# Altium footprint library WR-TBL_Pluggable Connector_5.08mm.PcbLib: 295 footprints (part 16 of 19)
Each footprint in its own frame and in the unit in brackets; x right, y up, seen from the top. Pads: shape width x height; smd on the part's side, far side on the other; paste and mask are expansions set on the pad; w line width, h text height; cw(c..) or ccw(c..) is an arc to the next point about the centre after c.
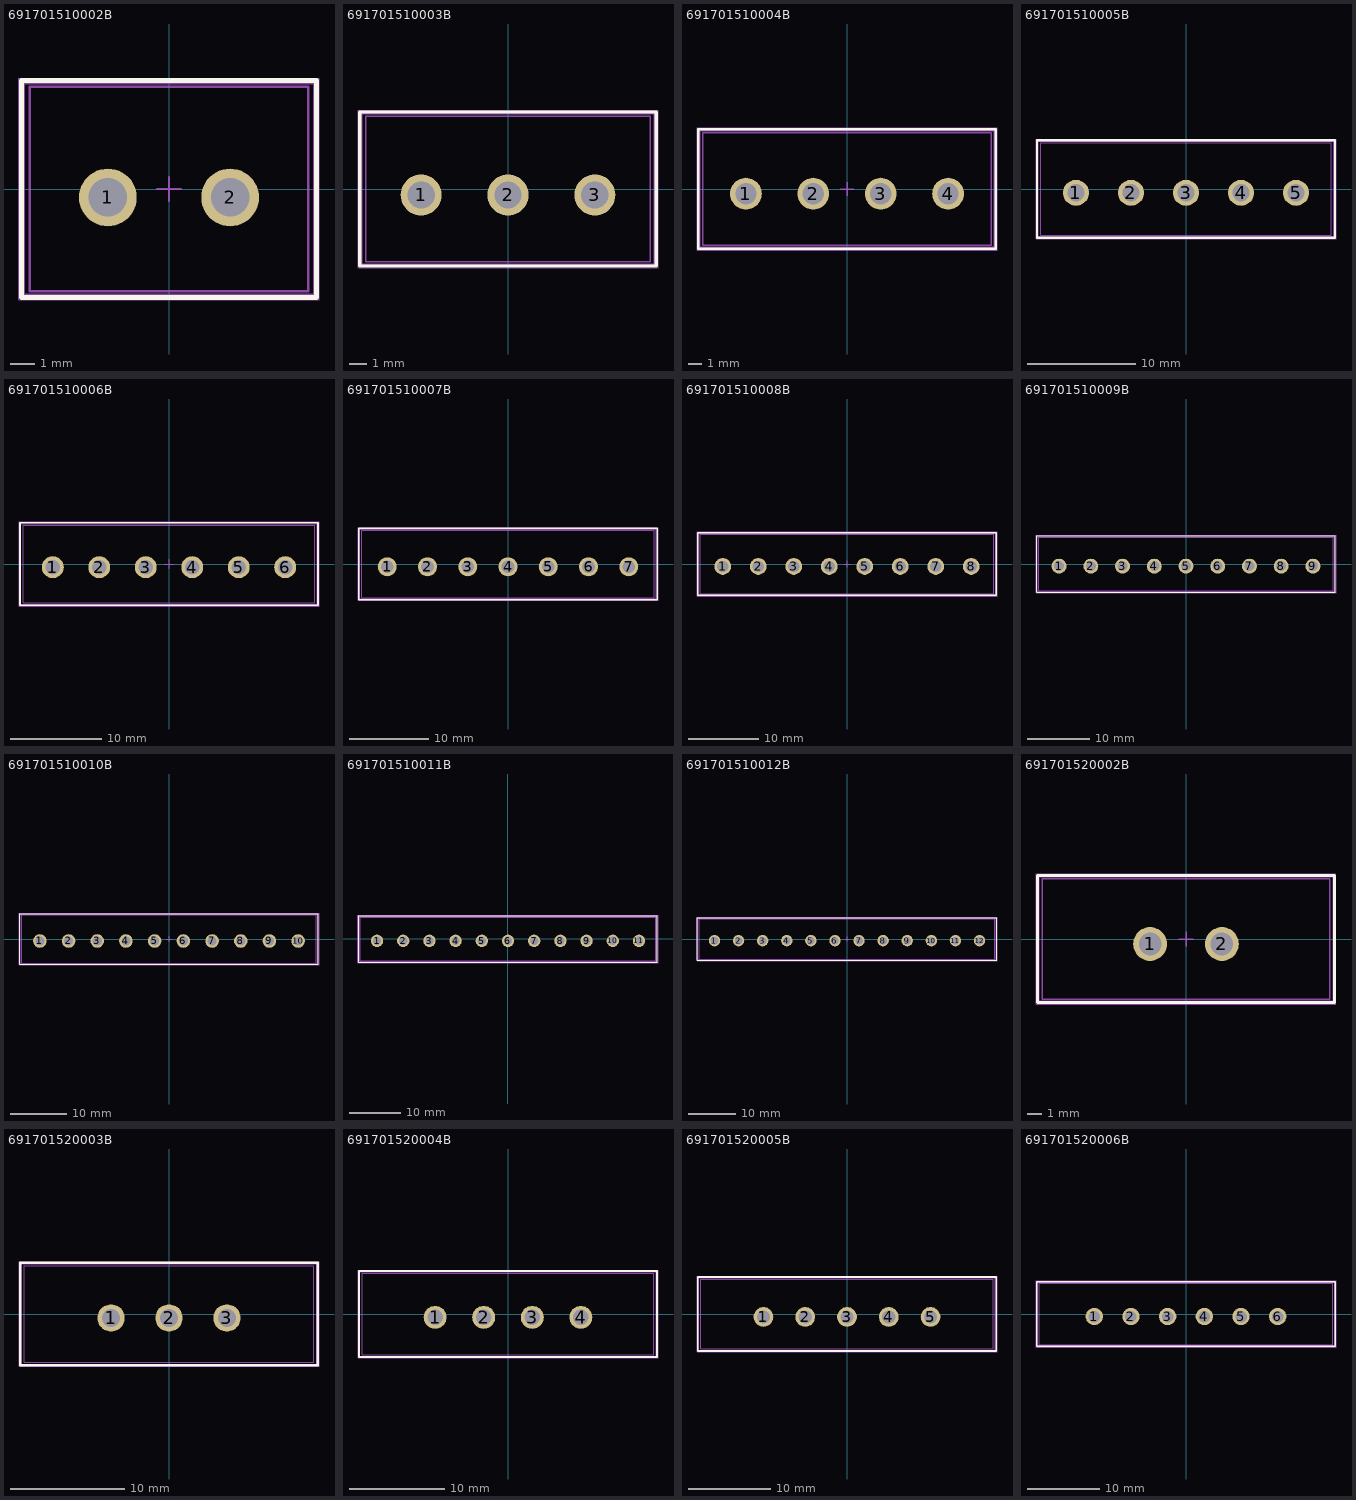
[diagram p15: the footprints below, top view; thin cyan lines are the x and y axes]

## 691701510002B [mm] "THR - 5,08mm - PCB Vertical Close - 02p"
height 12
pads (2):
  round 2.4 hole 1.6: 1(-2.54,-0.35) 2(2.54,-0.35)
Top Overlay:
  lines w0.2: -6.13,-4.5 6.13,-4.5 6.13,4.5 -6.13,4.5 -6.13,-4.5
Top Paste:
  region: 0.54,1.5 4.54,1.5 4.54,-2.2 0.54,-2.2
  region: -4.54,1.5 -0.54,1.5 -0.54,-2.2 -4.54,-2.2
Assembly Notes:
  text "Stencil thickness : 120 μm" at -5.156,-5.301 h1
Top Assembly:
  lines w0.1: -6.03,-4.4 -6.03,4.4 6.03,4.4 6.03,-4.4 -6.03,-4.4
Top Designator:
  text ".Designator" at -3.647,-0.357 h1
Top 3D Body:
  lines w0.1: -5.78,-4.25 5.78,-4.25 5.78,4.25 -5.78,4.25 -5.78,-4.25
Top Courtyard:
  lines w0.05: -6.23,-4.6 6.23,-4.6 6.23,4.6 -6.23,4.6 -6.23,-4.6
Top Component Center:
  lines w0.1: -0.5,0 0.5,0 ; 0,-0.5 0,0.5
3D body "691701510002B.stp": height 12.1, standoff -2.5, extent -5.78,-4.25 5.78,4.25

## 691701510003B [mm] "THR - 5,08mm - PCB Vertical Close - 03p"
height 12
pads (3):
  round 2.4 hole 1.6: 1(-5.08,-0.35) 2(0,-0.35) 3(5.08,-0.35)
Top Overlay:
  lines w0.2: -8.67,-4.5 8.67,-4.5 8.67,4.5 -8.67,4.5 -8.67,-4.5
Top Paste:
  region: 3.08,1.5 7.08,1.5 7.08,-2.2 3.08,-2.2
  region: -7.08,1.5 -3.08,1.5 -3.08,-2.2 -7.08,-2.2
  region: -2,1.5 2,1.5 2,-2.2 -2,-2.2
Assembly Notes:
  text "Stencil thickness : 120 μm" at -5.156,-5.301 h1
Top Assembly:
  lines w0.1: -8.57,-4.4 -8.57,4.4 8.57,4.4 8.57,-4.4 -8.57,-4.4
Top Designator:
  text ".Designator" at -3.647,-0.357 h1
Top 3D Body:
  lines w0.1: -8.32,-4.25 8.32,-4.25 8.32,4.25 -8.32,4.25 -8.32,-4.25
Top Courtyard:
  lines w0.05: -8.77,-4.6 8.77,-4.6 8.77,4.6 -8.77,4.6 -8.77,-4.6
Top Component Center:
  lines w0.1: -0.5,0 0.5,0 ; 0,-0.5 0,0.5
3D body "691701510003B.stp": height 12.1, standoff -2.5, extent -8.32,-4.25 8.32,4.25

## 691701510004B [mm] "THR - 5,08mm - PCB Vertical Close - 04p"
height 12
pads (4):
  round 2.4 hole 1.6: 1(-7.62,-0.35) 2(-2.54,-0.35) 3(2.54,-0.35) 4(7.62,-0.35)
Top Overlay:
  lines w0.2: -11.21,-4.5 -11.21,4.5 11.21,4.5 11.21,-4.5 -11.21,-4.5
Top Paste:
  region: 0.54,1.5 4.54,1.5 4.54,-2.2 0.54,-2.2
  region: -9.62,1.5 -5.62,1.5 -5.62,-2.2 -9.62,-2.2
  region: -4.54,1.5 -0.54,1.5 -0.54,-2.2 -4.54,-2.2
  region: 5.62,1.5 9.62,1.5 9.62,-2.2 5.62,-2.2
Assembly Notes:
  text "Stencil thickness : 120 μm" at -5.156,-5.301 h1
Top Assembly:
  lines w0.1: -11.11,-4.4 11.11,-4.4 11.11,4.4 -11.11,4.4 -11.11,-4.4
Top Designator:
  text ".Designator" at -3.647,-0.357 h1
Top 3D Body:
  lines w0.1: -10.86,-4.25 -10.86,4.25 10.86,4.25 10.86,-4.25 -10.86,-4.25
Top Courtyard:
  lines w0.05: -11.31,-4.6 -11.31,4.6 11.31,4.6 11.31,-4.6 -11.31,-4.6
Top Component Center:
  lines w0.1: -0.5,0 0.5,0 ; 0,-0.5 0,0.5
3D body "691701510004B.stp": height 12.1, standoff -2.5, extent -10.86,-4.25 10.86,4.25

## 691701510005B [mm] "THR - 5,08mm - PCB Vertical Close - 05p"
height 12
pads (5):
  round 2.4 hole 1.6: 1(-10.16,-0.35) 2(-5.08,-0.35) 3(0,-0.35) 4(5.08,-0.35) 5(10.16,-0.35)
Top Overlay:
  lines w0.2: -13.75,-4.5 -13.75,4.5 13.75,4.5 13.75,-4.5 -13.75,-4.5
Top Paste:
  region: 3.08,1.5 7.08,1.5 7.08,-2.2 3.08,-2.2
  region: -7.08,1.5 -3.08,1.5 -3.08,-2.2 -7.08,-2.2
  region: -12.16,1.5 -8.16,1.5 -8.16,-2.2 -12.16,-2.2
  region: -2,1.5 2,1.5 2,-2.2 -2,-2.2
  region: 8.16,1.5 12.16,1.5 12.16,-2.2 8.16,-2.2
Assembly Notes:
  text "Stencil thickness : 120 μm" at -5.156,-5.301 h1
Top Assembly:
  lines w0.1: -13.65,-4.4 13.65,-4.4 13.65,4.4 -13.65,4.4 -13.65,-4.4
Top Designator:
  text ".Designator" at -3.647,-0.357 h1
Top 3D Body:
  lines w0.1: -13.4,-4.25 -13.4,4.25 13.4,4.25 13.4,-4.25 -13.4,-4.25
Top Courtyard:
  lines w0.05: -13.85,-4.6 -13.85,4.6 13.85,4.6 13.85,-4.6 -13.85,-4.6
Top Component Center:
  lines w0.1: -0.5,0 0.5,0 ; 0,-0.5 0,0.5
3D body "691701510005B.stp": height 12.1, standoff -2.5, extent -13.4,-4.25 13.4,4.25

## 691701510006B [mm] "THR - 5,08mm - PCB Vertical Close - 06p"
height 12
pads (6):
  round 2.4 hole 1.6: 1(-12.7,-0.35) 2(-7.62,-0.35) 3(-2.54,-0.35) 4(2.54,-0.35) 5(7.62,-0.35) 6(12.7,-0.35)
Top Overlay:
  lines w0.2: -16.29,-4.5 16.29,-4.5 16.29,4.5 -16.29,4.5 -16.29,-4.5
Top Paste:
  region: 10.7,1.5 14.7,1.5 14.7,-2.2 10.7,-2.2
  region: 5.62,1.5 9.62,1.5 9.62,-2.2 5.62,-2.2
  region: -4.54,1.5 -0.54,1.5 -0.54,-2.2 -4.54,-2.2
  region: -14.7,1.5 -10.7,1.5 -10.7,-2.2 -14.7,-2.2
  region: -9.62,1.5 -5.62,1.5 -5.62,-2.2 -9.62,-2.2
  region: 0.54,1.5 4.54,1.5 4.54,-2.2 0.54,-2.2
Assembly Notes:
  text "Stencil thickness : 120 μm" at -5.156,-5.301 h1
Top Assembly:
  lines w0.1: -16.19,-4.4 -16.19,4.4 16.19,4.4 16.19,-4.4 -16.19,-4.4
Top Designator:
  text ".Designator" at -3.647,-0.357 h1
Top 3D Body:
  lines w0.1: -15.94,-4.25 15.94,-4.25 15.94,4.25 -15.94,4.25 -15.94,-4.25
Top Courtyard:
  lines w0.05: -16.39,-4.6 16.39,-4.6 16.39,4.6 -16.39,4.6 -16.39,-4.6
Top Component Center:
  lines w0.1: -0.5,0 0.5,0 ; 0,-0.5 0,0.5
3D body "691701510006B.stp": height 12.1, standoff -2.5, extent -15.94,-4.25 15.94,4.25

## 691701510007B [mm] "THR - 5,08mm - PCB Vertical Close - 07p"
height 12
pads (7):
  round 2.4 hole 1.6: 1(-15.24,-0.35) 2(-10.16,-0.35) 3(-5.08,-0.35) 4(0,-0.35) 5(5.08,-0.35) 6(10.16,-0.35) 7(15.24,-0.35)
Top Overlay:
  lines w0.2: -18.83,-4.5 18.83,-4.5 18.83,4.5 -18.83,4.5 -18.83,-4.5
Top Paste:
  region: 8.16,1.5 12.16,1.5 12.16,-2.2 8.16,-2.2
  region: 3.08,1.5 7.08,1.5 7.08,-2.2 3.08,-2.2
  region: -7.08,1.5 -3.08,1.5 -3.08,-2.2 -7.08,-2.2
  region: -17.24,1.5 -13.24,1.5 -13.24,-2.2 -17.24,-2.2
  region: -12.16,1.5 -8.16,1.5 -8.16,-2.2 -12.16,-2.2
  region: -2,1.5 2,1.5 2,-2.2 -2,-2.2
  region: 13.24,1.5 17.24,1.5 17.24,-2.2 13.24,-2.2
Assembly Notes:
  text "Stencil thickness : 120 μm" at -5.156,-5.301 h1
Top Assembly:
  lines w0.1: -18.73,-4.4 -18.73,4.4 18.73,4.4 18.73,-4.4 -18.73,-4.4
Top Designator:
  text ".Designator" at -3.647,-0.357 h1
Top 3D Body:
  lines w0.1: -18.48,-4.25 18.48,-4.25 18.48,4.25 -18.48,4.25 -18.48,-4.25
Top Courtyard:
  lines w0.05: -18.93,-4.6 18.93,-4.6 18.93,4.6 -18.93,4.6 -18.93,-4.6
Top Component Center:
  lines w0.1: -0.5,0 0.5,0 ; 0,-0.5 0,0.5
3D body "691701510007B.stp": height 12.1, standoff -2.5, extent -18.48,-4.25 18.48,4.25

## 691701510008B [mm] "THR - 5,08mm - PCB Vertical Close - 08p"
height 12
pads (8):
  round 2.4 hole 1.6: 1(-17.78,-0.35) 2(-12.7,-0.35) 3(-7.62,-0.35) 4(-2.54,-0.35) 5(2.54,-0.35) 6(7.62,-0.35) 7(12.7,-0.35) 8(17.78,-0.35)
Top Overlay:
  lines w0.2: -21.37,-4.5 -21.37,4.5 21.37,4.5 21.37,-4.5 -21.37,-4.5
Top Paste:
  region: 10.7,1.5 14.7,1.5 14.7,-2.2 10.7,-2.2
  region: -4.54,1.5 -0.54,1.5 -0.54,-2.2 -4.54,-2.2
  region: -14.7,1.5 -10.7,1.5 -10.7,-2.2 -14.7,-2.2
  region: -19.78,1.5 -15.78,1.5 -15.78,-2.2 -19.78,-2.2
  region: -9.62,1.5 -5.62,1.5 -5.62,-2.2 -9.62,-2.2
  region: 0.54,1.5 4.54,1.5 4.54,-2.2 0.54,-2.2
  region: 5.62,1.5 9.62,1.5 9.62,-2.2 5.62,-2.2
  region: 15.78,1.5 19.78,1.5 19.78,-2.2 15.78,-2.2
Assembly Notes:
  text "Stencil thickness : 120 μm" at -5.156,-5.301 h1
Top Assembly:
  lines w0.1: -21.27,-4.4 21.27,-4.4 21.27,4.4 -21.27,4.4 -21.27,-4.4
Top Designator:
  text ".Designator" at -3.647,-0.357 h1
Top 3D Body:
  lines w0.1: -21.02,-4.25 -21.02,4.25 21.02,4.25 21.02,-4.25 -21.02,-4.25
Top Courtyard:
  lines w0.05: -21.47,-4.6 -21.47,4.6 21.47,4.6 21.47,-4.6 -21.47,-4.6
Top Component Center:
  lines w0.1: -0.5,0 0.5,0 ; 0,-0.5 0,0.5
3D body "691701510008B.stp": height 12.1, standoff -2.5, extent -21.02,-4.25 21.02,4.25

## 691701510009B [mm] "THR - 5,08mm - PCB Vertical Close - 09p"
height 12
pads (9):
  round 2.4 hole 1.6: 1(-20.32,-0.35) 2(-15.24,-0.35) 3(-10.16,-0.35) 4(-5.08,-0.35) 5(0,-0.35) 6(5.08,-0.35) 7(10.16,-0.35) 8(15.24,-0.35) 9(20.32,-0.35)
Top Overlay:
  lines w0.2: -23.91,-4.5 23.91,-4.5 23.91,4.5 -23.91,4.5 -23.91,-4.5
Top Paste:
  region: 8.16,1.5 12.16,1.5 12.16,-2.2 8.16,-2.2
  region: -7.08,1.5 -3.08,1.5 -3.08,-2.2 -7.08,-2.2
  region: -17.24,1.5 -13.24,1.5 -13.24,-2.2 -17.24,-2.2
  region: -22.32,1.5 -18.32,1.5 -18.32,-2.2 -22.32,-2.2
  region: -12.16,1.5 -8.16,1.5 -8.16,-2.2 -12.16,-2.2
  region: -2,1.5 2,1.5 2,-2.2 -2,-2.2
  region: 3.08,1.5 7.08,1.5 7.08,-2.2 3.08,-2.2
  region: 13.24,1.5 17.24,1.5 17.24,-2.2 13.24,-2.2
  region: 18.32,1.5 22.32,1.5 22.32,-2.2 18.32,-2.2
Assembly Notes:
  text "Stencil thickness : 120 μm" at -5.156,-5.301 h1
Top Assembly:
  lines w0.1: -23.81,-4.4 -23.81,4.4 23.81,4.4 23.81,-4.4 -23.81,-4.4
Top Designator:
  text ".Designator" at -3.647,-0.357 h1
Top 3D Body:
  lines w0.1: -23.56,-4.25 23.56,-4.25 23.56,4.25 -23.56,4.25 -23.56,-4.25
Top Courtyard:
  lines w0.05: -24.01,-4.6 24.01,-4.6 24.01,4.6 -24.01,4.6 -24.01,-4.6
Top Component Center:
  lines w0.1: -0.5,0 0.5,0 ; 0,-0.5 0,0.5
3D body "691701510009B.stp": height 12.1, standoff -2.5, extent -23.56,-4.25 23.56,4.25

## 691701510010B [mm] "THR - 5,08mm - PCB Vertical Close - 10p"
height 12
pads (10):
  round 2.4 hole 1.6: 1(-22.86,-0.35) 2(-17.78,-0.35) 3(-12.7,-0.35) 4(-7.62,-0.35) 5(-2.54,-0.35) 6(2.54,-0.35) 7(7.62,-0.35) 8(12.7,-0.35) 9(17.78,-0.35) 10(22.86,-0.35)
Top Overlay:
  lines w0.2: -26.45,-4.5 26.45,-4.5 26.45,4.5 -26.45,4.5 -26.45,-4.5
Top Paste:
  region: 5.62,1.5 9.62,1.5 9.62,-2.2 5.62,-2.2
  region: -9.62,1.5 -5.62,1.5 -5.62,-2.2 -9.62,-2.2
  region: -19.78,1.5 -15.78,1.5 -15.78,-2.2 -19.78,-2.2
  region: -24.86,1.5 -20.86,1.5 -20.86,-2.2 -24.86,-2.2
  region: -14.7,1.5 -10.7,1.5 -10.7,-2.2 -14.7,-2.2
  region: -4.54,1.5 -0.54,1.5 -0.54,-2.2 -4.54,-2.2
  region: 0.54,1.5 4.54,1.5 4.54,-2.2 0.54,-2.2
  region: 10.7,1.5 14.7,1.5 14.7,-2.2 10.7,-2.2
  region: 15.78,1.5 19.78,1.5 19.78,-2.2 15.78,-2.2
  region: 20.86,1.5 24.86,1.5 24.86,-2.2 20.86,-2.2
Assembly Notes:
  text "Stencil thickness : 120 μm" at -5.156,-5.301 h1
Top Assembly:
  lines w0.1: -26.35,-4.4 -26.35,4.4 26.35,4.4 26.35,-4.4 -26.35,-4.4
Top Designator:
  text ".Designator" at -3.647,-0.357 h1
Top 3D Body:
  lines w0.1: -26.1,-4.25 26.1,-4.25 26.1,4.25 -26.1,4.25 -26.1,-4.25
Top Courtyard:
  lines w0.05: -26.55,-4.6 26.55,-4.6 26.55,4.6 -26.55,4.6 -26.55,-4.6
Top Component Center:
  lines w0.1: -0.5,0 0.5,0 ; 0,-0.5 0,0.5
3D body "691701510010B.stp": height 12.1, standoff -2.5, extent -26.1,-4.25 26.1,4.25

## 691701510011B [mm] "THR - 5,08mm - PCB Vertical Close - 11p"
height 12
pads (11):
  round 2.4 hole 1.6: 1(-25.4,-0.35) 2(-20.32,-0.35) 3(-15.24,-0.35) 4(-10.16,-0.35) 5(-5.08,-0.35) 6(0,-0.35) 7(5.08,-0.35) 8(10.16,-0.35) 9(15.24,-0.35) 10(20.32,-0.35) 11(25.4,-0.35)
Top Overlay:
  lines w0.2: -28.99,-4.5 28.99,-4.5 28.99,4.5 -28.99,4.5 -28.99,-4.5
Top Paste:
  region: 23.4,1.5 27.4,1.5 27.4,-2.2 23.4,-2.2
  region: 18.32,1.5 22.32,1.5 22.32,-2.2 18.32,-2.2
  region: 13.24,1.5 17.24,1.5 17.24,-2.2 13.24,-2.2
  region: 8.16,1.5 12.16,1.5 12.16,-2.2 8.16,-2.2
  region: -2,1.5 2,1.5 2,-2.2 -2,-2.2
  region: -7.08,1.5 -3.08,1.5 -3.08,-2.2 -7.08,-2.2
  region: -17.24,1.5 -13.24,1.5 -13.24,-2.2 -17.24,-2.2
  region: -27.4,1.5 -23.4,1.5 -23.4,-2.2 -27.4,-2.2
  region: -22.32,1.5 -18.32,1.5 -18.32,-2.2 -22.32,-2.2
  region: -12.16,1.5 -8.16,1.5 -8.16,-2.2 -12.16,-2.2
  region: 3.08,1.5 7.08,1.5 7.08,-2.2 3.08,-2.2
Assembly Notes:
  text "Stencil thickness : 120 μm" at -5.156,-5.301 h1
Top Assembly:
  lines w0.1: -28.89,-4.4 -28.89,4.4 28.89,4.4 28.89,-4.4 -28.89,-4.4
Top Designator:
  text ".Designator" at -3.647,-0.357 h1
Top 3D Body:
  lines w0.1: -28.64,-4.25 28.64,-4.25 28.64,4.25 -28.64,4.25 -28.64,-4.25
Top Courtyard:
  lines w0.05: -29.09,-4.6 29.09,-4.6 29.09,4.6 -29.09,4.6 -29.09,-4.6
Top Component Center:
  lines w0.1: -0.5,0 0.5,0 ; 0,-0.5 0,0.5
3D body "691701510011B.stp": height 12.1, standoff -2.5, extent -28.64,-4.25 28.64,4.25

## 691701510012B [mm] "THR - 5,08mm - PCB Vertical Close - 12p"
height 12
pads (12):
  round 2.4 hole 1.6: 1(-27.94,-0.35) 2(-22.86,-0.35) 3(-17.78,-0.35) 4(-12.7,-0.35) 5(-7.62,-0.35) 6(-2.54,-0.35) 7(2.54,-0.35) 8(7.62,-0.35) 9(12.7,-0.35) 10(17.78,-0.35) 11(22.86,-0.35) 12(27.94,-0.35)
Top Overlay:
  lines w0.2: -31.53,-4.5 -31.53,4.5 31.53,4.5 31.53,-4.5 -31.53,-4.5
Top Paste:
  region: 25.94,1.5 29.94,1.5 29.94,-2.2 25.94,-2.2
  region: 0.54,1.5 4.54,1.5 4.54,-2.2 0.54,-2.2
  region: -14.7,1.5 -10.7,1.5 -10.7,-2.2 -14.7,-2.2
  region: -24.86,1.5 -20.86,1.5 -20.86,-2.2 -24.86,-2.2
  region: -29.94,1.5 -25.94,1.5 -25.94,-2.2 -29.94,-2.2
  region: -19.78,1.5 -15.78,1.5 -15.78,-2.2 -19.78,-2.2
  region: -9.62,1.5 -5.62,1.5 -5.62,-2.2 -9.62,-2.2
  region: -4.54,1.5 -0.54,1.5 -0.54,-2.2 -4.54,-2.2
  region: 5.62,1.5 9.62,1.5 9.62,-2.2 5.62,-2.2
  region: 10.7,1.5 14.7,1.5 14.7,-2.2 10.7,-2.2
  region: 15.78,1.5 19.78,1.5 19.78,-2.2 15.78,-2.2
  region: 20.86,1.5 24.86,1.5 24.86,-2.2 20.86,-2.2
Assembly Notes:
  text "Stencil thickness : 120 μm" at -5.156,-5.301 h1
Top Assembly:
  lines w0.1: -31.43,-4.4 31.43,-4.4 31.43,4.4 -31.43,4.4 -31.43,-4.4
Top Designator:
  text ".Designator" at -3.647,-0.357 h1
Top 3D Body:
  lines w0.1: -31.18,-4.25 -31.18,4.25 31.18,4.25 31.18,-4.25 -31.18,-4.25
Top Courtyard:
  lines w0.05: -31.63,-4.6 -31.63,4.6 31.63,4.6 31.63,-4.6 -31.63,-4.6
Top Component Center:
  lines w0.1: -0.5,0 0.5,0 ; 0,-0.5 0,0.5
3D body "691701510012B.stp": height 12.1, standoff -2.5, extent -31.18,-4.25 31.18,4.25

## 691701520002B [mm] "THR - 5,08mm - PCB Vertical Flange - 02p"
height 12
pads (2):
  round 2.4 hole 1.6: 1(-2.54,-0.35) 2(2.54,-0.35)
Top Overlay:
  lines w0.2: -10.51,-4.5 10.51,-4.5 10.51,4.5 -10.51,4.5 -10.51,-4.5
Top Paste:
  region: -4.54,1.5 -0.54,1.5 -0.54,-2.2 -4.54,-2.2
  region: 0.54,1.5 4.54,1.5 4.54,-2.2 0.54,-2.2
Assembly Notes:
  text "Stencil thickness : 120 μm" at -5.156,-5.301 h1
Top Assembly:
  lines w0.1: -10.41,-4.4 10.41,-4.4 10.41,4.4 -10.41,4.4 -10.41,-4.4
Top Designator:
  text ".Designator" at -3.647,-0.357 h1
Top 3D Body:
  lines w0.1: -10.16,-4.25 10.16,-4.25 10.16,4.25 -10.16,4.25 -10.16,-4.25
Top Courtyard:
  lines w0.05: -10.61,-4.6 -10.61,4.6 10.61,4.6 10.61,-4.6 -10.61,-4.6
Top Component Center:
  lines w0.1: -0.5,0 0.5,0 ; 0,-0.5 0,0.5
3D body "691701520002B.stp": height 12.11, standoff -2.5, extent -10.16,-4.25 10.16,4.25

## 691701520003B [mm] "THR - 5,08mm - PCB Vertical Flange - 03p"
height 12
pads (3):
  round 2.4 hole 1.6: 1(-5.08,-0.35) 2(0,-0.35) 3(5.08,-0.35)
Top Overlay:
  lines w0.2: -13.05,-4.5 13.05,-4.5 13.05,4.5 -13.05,4.5 -13.05,-4.5
Top Paste:
  region: 3.08,1.5 7.08,1.5 7.08,-2.2 3.08,-2.2
  region: -2,1.5 2,1.5 2,-2.2 -2,-2.2
  region: -7.08,1.5 -3.08,1.5 -3.08,-2.2 -7.08,-2.2
Assembly Notes:
  text "Stencil thickness : 120 μm" at -5.156,-5.301 h1
Top Assembly:
  lines w0.1: -12.95,-4.4 12.95,-4.4 12.95,4.4 -12.95,4.4 -12.95,-4.4
Top Designator:
  text ".Designator" at -3.647,-0.357 h1
Top 3D Body:
  lines w0.1: -12.7,-4.25 12.7,-4.25 12.7,4.25 -12.7,4.25 -12.7,-4.25
Top Courtyard:
  lines w0.05: -13.15,-4.6 -13.15,4.6 13.15,4.6 13.15,-4.6 -13.15,-4.6
3D body "691701520003B.stp": height 12.11, standoff -2.5, extent -12.7,-4.25 12.7,4.25

## 691701520004B [mm] "THR - 5,08mm - PCB Vertical Flange - 04p"
height 12
pads (4):
  round 2.4 hole 1.6: 1(-7.62,-0.35) 2(-2.54,-0.35) 3(2.54,-0.35) 4(7.62,-0.35)
Top Overlay:
  lines w0.2: -15.59,-4.5 15.59,-4.5 15.59,4.5 -15.59,4.5 -15.59,-4.5
Top Paste:
  region: 5.62,1.5 9.62,1.5 9.62,-2.2 5.62,-2.2
  region: 0.54,1.5 4.54,1.5 4.54,-2.2 0.54,-2.2
  region: -4.54,1.5 -0.54,1.5 -0.54,-2.2 -4.54,-2.2
  region: -9.62,1.5 -5.62,1.5 -5.62,-2.2 -9.62,-2.2
Assembly Notes:
  text "Stencil thickness : 120 μm" at -5.156,-5.301 h1
Top Assembly:
  lines w0.1: -15.49,-4.4 15.49,-4.4 15.49,4.4 -15.49,4.4 -15.49,-4.4
Top Designator:
  text ".Designator" at -3.647,-0.357 h1
Top 3D Body:
  lines w0.1: -15.24,-4.25 15.24,-4.25 15.24,4.25 -15.24,4.25 -15.24,-4.25
Top Courtyard:
  lines w0.05: -15.69,-4.6 -15.69,4.6 15.69,4.6 15.69,-4.6 -15.69,-4.6
3D body "691701520004B.stp": height 12.11, standoff -2.5, extent -15.24,-4.25 15.24,4.25

## 691701520005B [mm] "THR - 5,08mm - PCB Vertical Flange - 05p"
height 12
pads (5):
  round 2.4 hole 1.6: 1(-10.16,-0.35) 2(-5.08,-0.35) 3(0,-0.35) 4(5.08,-0.35) 5(10.16,-0.35)
Top Overlay:
  lines w0.2: -18.13,-4.5 18.13,-4.5 18.13,4.5 -18.13,4.5 -18.13,-4.5
Top Paste:
  region: -12.16,1.5 -8.16,1.5 -8.16,-2.2 -12.16,-2.2
  region: -7.08,1.5 -3.08,1.5 -3.08,-2.2 -7.08,-2.2
  region: -2,1.5 2,1.5 2,-2.2 -2,-2.2
  region: 3.08,1.5 7.08,1.5 7.08,-2.2 3.08,-2.2
  region: 8.16,1.5 12.16,1.5 12.16,-2.2 8.16,-2.2
Assembly Notes:
  text "Stencil thickness : 120 μm" at -5.156,-5.301 h1
Top Assembly:
  lines w0.1: -18.03,-4.4 18.03,-4.4 18.03,4.4 -18.03,4.4 -18.03,-4.4
Top Designator:
  text ".Designator" at -3.647,-0.357 h1
Top 3D Body:
  lines w0.1: -17.78,-4.25 17.78,-4.25 17.78,4.25 -17.78,4.25 -17.78,-4.25
Top Courtyard:
  lines w0.05: -18.23,-4.6 -18.23,4.6 18.23,4.6 18.23,-4.6 -18.23,-4.6
3D body "691701520005B.stp": height 12.11, standoff -2.5, extent -17.78,-4.25 17.78,4.25

## 691701520006B [mm] "THR - 5,08mm - PCB Vertical Flange - 06p"
height 12
pads (6):
  round 2.4 hole 1.6: 1(-12.7,-0.35) 2(-7.62,-0.35) 3(-2.54,-0.35) 4(2.54,-0.35) 5(7.62,-0.35) 6(12.7,-0.35)
Top Overlay:
  lines w0.2: -20.67,-4.5 20.67,-4.5 20.67,4.5 -20.67,4.5 -20.67,-4.5
Top Paste:
  region: 10.7,1.5 14.7,1.5 14.7,-2.2 10.7,-2.2
  region: 5.62,1.5 9.62,1.5 9.62,-2.2 5.62,-2.2
  region: 0.54,1.5 4.54,1.5 4.54,-2.2 0.54,-2.2
  region: -4.54,1.5 -0.54,1.5 -0.54,-2.2 -4.54,-2.2
  region: -9.62,1.5 -5.62,1.5 -5.62,-2.2 -9.62,-2.2
  region: -14.7,1.5 -10.7,1.5 -10.7,-2.2 -14.7,-2.2
Assembly Notes:
  text "Stencil thickness : 120 μm" at -5.156,-5.301 h1
Top Assembly:
  lines w0.1: -20.57,-4.4 20.57,-4.4 20.57,4.4 -20.57,4.4 -20.57,-4.4
Top Designator:
  text ".Designator" at -3.647,-0.357 h1
Top 3D Body:
  lines w0.1: -20.32,-4.25 20.32,-4.25 20.32,4.25 -20.32,4.25 -20.32,-4.25
Top Courtyard:
  lines w0.05: -20.77,-4.6 -20.77,4.6 20.77,4.6 20.77,-4.6 -20.77,-4.6
3D body "691701520006B.stp": height 12.11, standoff -2.5, extent -20.32,-4.25 20.32,4.25